# Altium schematic symbol library 2019-12-03_07-12-34.SchLib: 2 symbols
Pins are listed as number, name and electrical type; pins without a type are passive.

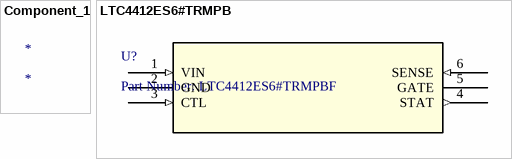
[diagram p0: symbols Component_1 to LTC4412ES6#TRMPB]

## Component_1
designator *

## LTC4412ES6#TRMPB
designator U?, comment Part Number: LTC4412ES6#TRMPBF
No Description Available; Vendor: Linear Technology; Built_By: EMA_UL_Team; Manufacturer_Part_Number: LTC4412ES6#TRMPBF; Copyright: Copyright (C) 2018 Accelerated Designs. All rights reserved; RefDes: RefDes; Type: DEV; Value: Value
footprint SOT-6_S
pins: 1 VIN (in), 2 GND (power), 3 CTL (in), 4 STAT (out), 5 GATE, 6 SENSE (in)